# Altium footprint library TitansLib.PcbLib: 333 footprints (part 11 of 21)
Each footprint in its own frame and in the unit in brackets; x right, y up, seen from the top. Pads: shape width x height; smd on the part's side, far side on the other; paste and mask are expansions set on the pad; w line width, h text height; cw(c..) or ccw(c..) is an arc to the next point about the centre after c.
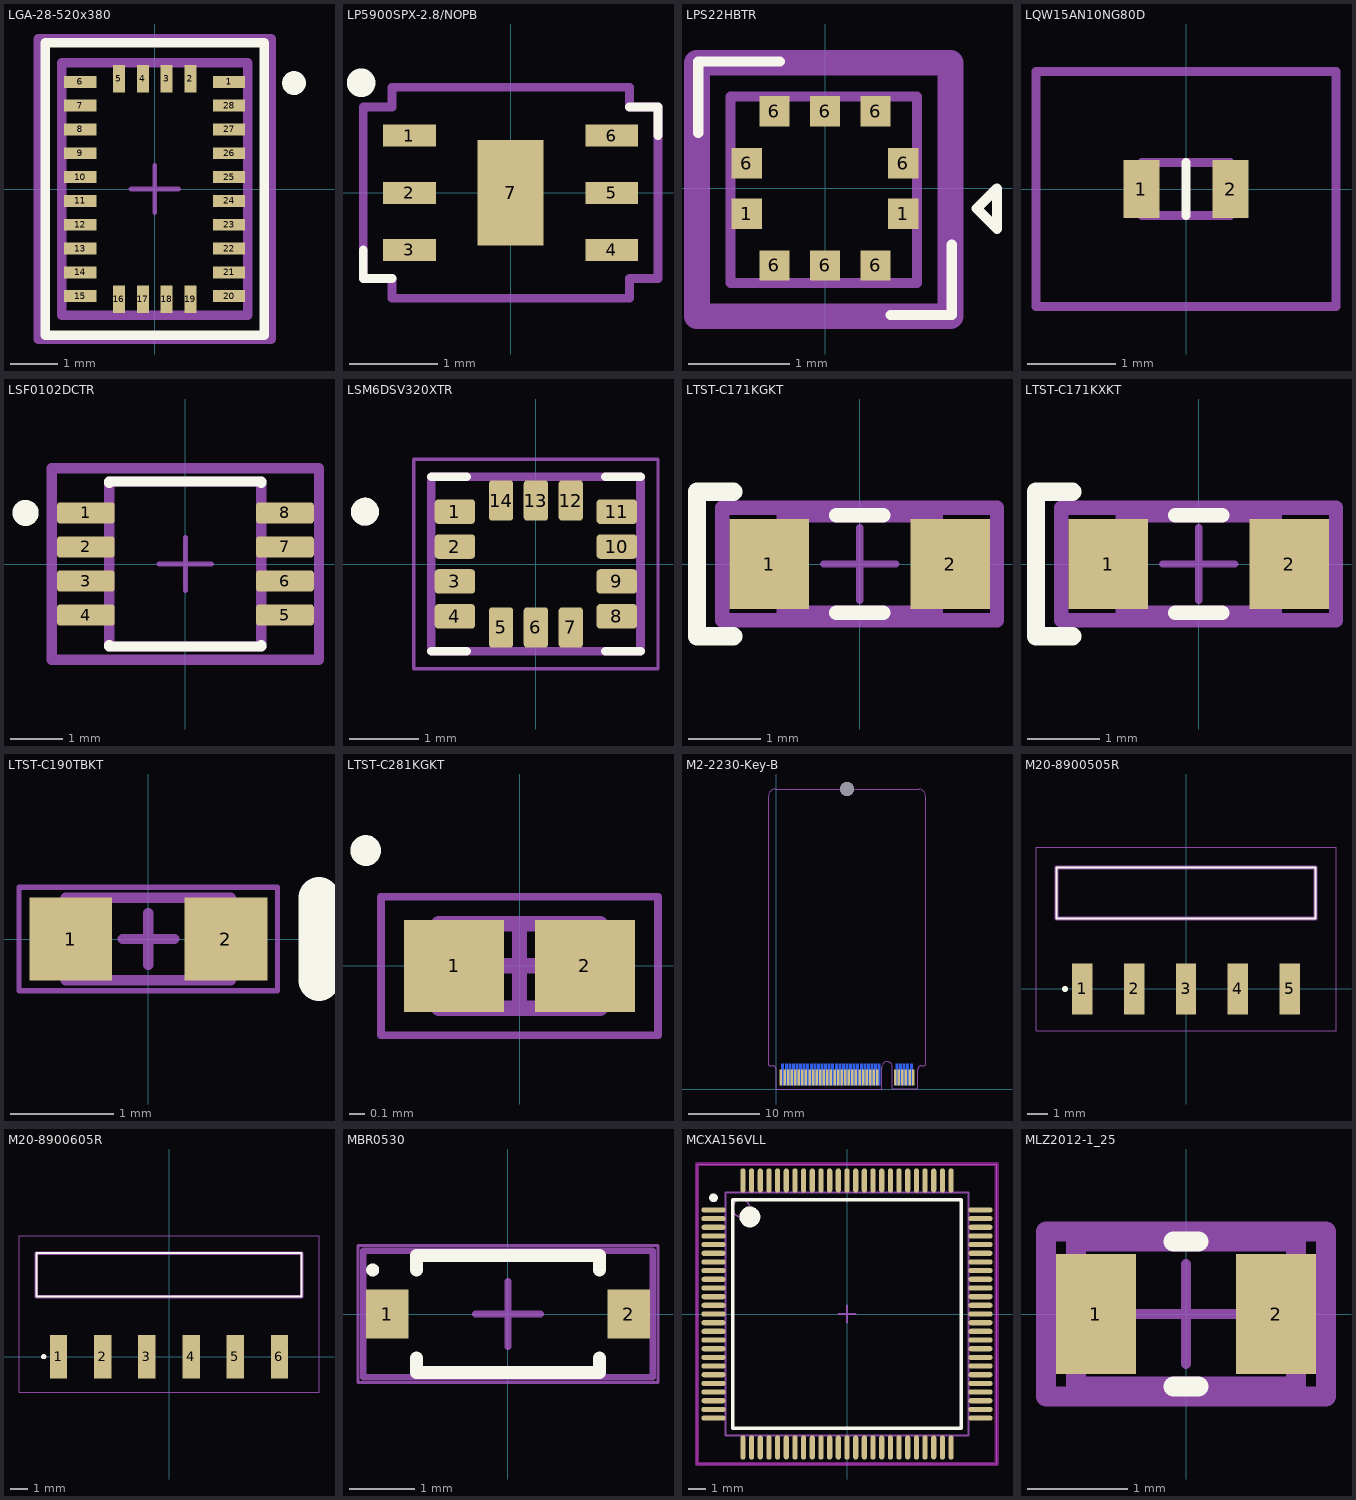
[diagram p10: the footprints below, top view; thin cyan lines are the x and y axes]

## LGA-28-520x380 [mm] "28 pin Land Grid Array Package. 5.2x3.8 mm"
pads (28):
  rect 0.675x0.25 smd paste+0 mask+0: 1(1.562,2.25) 6(-1.562,2.25) 7(-1.562,1.75) 8(-1.562,1.25) 9(-1.562,0.75) 10(-1.562,0.25) 11(-1.562,-0.25) 12(-1.562,-0.75) 13(-1.562,-1.25) 14(-1.562,-1.75) 15(-1.562,-2.25) 20(1.562,-2.25) 21(1.562,-1.75) 22(1.562,-1.25) 23(1.562,-0.75) 24(1.562,-0.25) 25(1.562,0.25) 26(1.562,0.75) 27(1.562,1.25) 28(1.562,1.75)
  rect 0.25x0.575 smd paste+0 mask+0: 2(0.75,2.312) 3(0.25,2.312) 4(-0.25,2.312) 5(-0.75,2.312) 16(-0.75,-2.312) 17(-0.25,-2.312) 18(0.25,-2.312) 19(0.75,-2.312)
Top Overlay:
  circle w0.25: c2.925,2.225 r0.125
  lines w0.2: -2.3,-3.075 2.3,-3.075 2.3,3.075 -2.3,3.075 -2.3,-3.075
Top 3D Body:
  lines w0.2: -1.95,-2.65 1.95,-2.65 1.95,2.65 -1.95,2.65 -1.95,-2.65
Top Courtyard:
  lines w0.2: -2.45,-3.15 2.45,-3.15 2.45,3.15 -2.45,3.15 -2.45,-3.15
Top Component Center:
  lines w0.1: -0.5,0 0.5,0 ; 0,-0.5 0,0.5
Top Assembly:
  lines w0.2: -2.45,-3.15 2.45,-3.15 2.45,3.15 -2.45,3.15 -2.45,-3.15
  text ".Designator" at 0,-0.001 h1
3D body "IC_Hillcrest_Laboratories_Inc_BNO085_eec.STEP": height 0.25, standoff 0, extent -2.45,-3.15 2.45,3.15

## LP5900SPX-2.8/NOPB [mm]
pads (7):
  rect 0.6x0.25 smd: 1(-1.15,0.65) 2(-1.15,0) 3(-1.15,-0.65) 4(1.15,-0.65) 5(1.15,0) 6(1.15,0.65)
  rect 0.75x1.2 smd: 7(0,0)
Top Overlay:
  circle w0.254: c-1.7,1.25 r0.035
  lines w0.1: -1.675,-0.65 -1.675,-0.975 -1.35,-0.975 ; 1.35,0.975 1.675,0.975 1.675,0.65
Top Courtyard:
  lines w0.1: -1.375,-0.975 -1.675,-0.975 -1.675,0.975 -1.35,0.975 -1.35,1.2 1.35,1.2 1.35,0.975 1.675,0.975 1.675,-0.975 1.375,-0.975 ; -1.35,-0.975 -1.35,-1.2 1.35,-1.2 1.35,-0.975
3D body "LP5900SDX-2.8_NOPB.step": height 0.81, standoff 0.01, extent -1.25,-1.1 1.25,1.1

## LPS22HBTR [mm]
pads (10):
  rect 0.3x0.3 smd mask+0.1: 1(-0.775,-0.25) 1(0.775,-0.25) 6(-0.775,0.25) 6(-0.5,-0.763) 6(-0.5,0.763) 6(0,-0.763) 6(0,0.763) 6(0.5,-0.763) 6(0.5,0.763) 6(0.775,0.25)
Top Overlay:
  lines w0.1: -1.254,0.546 -1.254,1.254 -0.446,1.254 ; 0.646,-1.254 1.254,-1.254 1.254,-0.554 ; 1.502,-0.2 1.702,-0.4 1.702,0 1.502,-0.2
Top Assembly:
  lines w0.1: -0.936,-0.936 0.91,-0.936 0.91,0.91 -0.936,0.91 -0.936,-0.936
  text ".Designator" at -0.821,-0.212 h1
Mechanical 15:
  lines w0.254: -1.267,-1.267 1.241,-1.267 1.241,1.241 -1.267,1.241 -1.267,-1.267
3D body "LPS22HBTR.stp": height 0.81, standoff 0.01, extent -1.003,-1 0.997,1

## LQW15AN10NG80D [mm]
pads (2):
  rect 0.41x0.66 smd: 1(-0.505,0) 2(0.505,0)
Top Overlay:
  lines w0.1: 0,-0.3 0,0.3
Bottom Assembly:
  lines w0.1: -1.7,-1.33 -1.7,1.33 1.7,1.33 1.7,-1.33 -1.7,-1.33
Mechanical 15:
  lines w0.1: -0.5,-0.3 -0.5,0.3 0.5,0.3 0.5,-0.3 -0.5,-0.3
3D body "LQW15AN2N2B80D.stp": height 0.6, standoff 0, extent -0.501,-0.249 0.499,0.251

## LSF0102DCTR [mm]
pads (8):
  rrect25% 1.1x0.4 smd paste+0 mask+0.051: 1(-1.9,0.975) 2(-1.9,0.325) 3(-1.9,-0.325) 4(-1.9,-0.975) 5(1.9,-0.975) 6(1.9,-0.325) 7(1.9,0.325) 8(1.9,0.975)
Top Overlay:
  circle w0.25: c-3.052,0.975 r0.125
  lines w0.2: -1.45,-1.55 -1.45,-1.575 1.45,-1.575 1.45,-1.55 ; -1.45,1.55 -1.45,1.575 1.45,1.575 1.45,1.55
Top 3D Body:
  lines w0.2: -1.45,-1.575 1.45,-1.575 1.45,1.575 -1.45,1.575 -1.45,-1.575
Top Courtyard:
  lines w0.2: -2.55,-1.825 2.55,-1.825 2.55,1.825 -2.55,1.825 -2.55,-1.825
Top Component Center:
  lines w0.1: -0.5,0 0.5,0 ; 0,-0.5 0,0.5
Top Assembly:
  lines w0.2: -2.55,-1.825 2.55,-1.825 2.55,1.825 -2.55,1.825 -2.55,-1.825
  text ".Designator" at 0,0.188 h1
3D body "IC_Texas_Instruments_SN74LVC3G34DCTR_eec.STEP": height 0.25, standoff 0, extent -2.55,-1.825 2.55,1.825

## LSM6DSV320XTR [mm]
height 0.86
pads (14):
  rrect29% 0.58x0.35 smd mask+0.025: 1(-1.16,0.75) 2(-1.16,0.25) 3(-1.16,-0.25) 4(-1.16,-0.75) 8(1.16,-0.75) 9(1.16,-0.25) 10(1.16,0.25) 11(1.16,0.75)
  rrect29% 0.35x0.58 smd mask+0.025: 5(-0.5,-0.91) 6(0,-0.91) 7(0.5,-0.91) 12(0.5,0.91) 13(0,0.91) 14(-0.5,0.91)
Top Overlay:
  circle w0.2: c-2.45,0.75 r0.1
  lines w0.127: -1.5,-1.25 -0.995,-1.25 ; -1.5,1.25 -0.995,1.25 ; 0.995,-1.25 1.5,-1.25 ; 0.995,1.25 1.5,1.25
Top Courtyard:
  lines w0.05: -1.75,-1.5 -1.75,1.5 1.75,1.5 1.75,-1.5 -1.75,-1.5
Mechanical 13:
  circle w0.2: c-2.45,0.75 r0.1
  lines w0.127: -1.5,-1.25 1.5,-1.25 1.5,1.25 -1.5,1.25 -1.5,-1.25
3D body "step_temp.STEP": height 0.83, standoff 0, extent -1.5,-1.25 1.5,1.25

## LTST-C171KGKT [mm]
pads (2):
  rect 1.1x1.25 smd paste+0 mask+0.05: 1(-1.25,0) 2(1.25,0)
Top Overlay:
  lines w0.2: -0.325,-0.675 0.325,-0.675 ; -0.325,0.675 0.325,0.675
  lines w0.254: -1.75,-1 -2.25,-1 -2.25,1 -1.75,1
Top 3D Body:
  lines w0.2: -1.05,-0.675 1.05,-0.675 1.05,0.675 -1.05,0.675 -1.05,-0.675
Top Courtyard:
  lines w0.2: -1.9,-0.775 1.9,-0.775 1.9,0.775 -1.9,0.775 -1.9,-0.775
Top Component Center:
  lines w0.1: -0.5,0 0.5,0 ; 0,-0.5 0,0.5
Top Assembly:
  lines w0.2: -1.9,-0.775 1.9,-0.775 1.9,0.775 -1.9,0.775 -1.9,-0.775
  text ".Designator" at 0,-0.001 h1
3D body "Diode_Lite-On_LTST-C171KGKT_eec.STEP": height 0.25, standoff 0, extent -1.9,-0.775 1.9,0.775

## LTST-C171KXKT [mm]
pads (2):
  rect 1.1x1.25 smd paste+0 mask+0.05: 1(-1.25,0) 2(1.25,0)
Top Overlay:
  lines w0.2: -0.325,-0.675 0.325,-0.675 ; -0.325,0.675 0.325,0.675
  lines w0.254: -1.75,-1 -2.25,-1 -2.25,1 -1.75,1
Top 3D Body:
  lines w0.2: -1.05,-0.675 -1.05,0.675 1.05,0.675 1.05,-0.675 -1.05,-0.675
Top Courtyard:
  lines w0.2: -1.9,-0.775 -1.9,0.775 1.9,0.775 1.9,-0.775 -1.9,-0.775
Top Component Center:
  lines w0.1: -0.5,0 0.5,0 ; 0,-0.5 0,0.5
Top Assembly:
  lines w0.2: -1.9,-0.775 -1.9,0.775 1.9,0.775 1.9,-0.775 -1.9,-0.775
  text ".Designator" at 0,-0.001 h1
3D body "LTST-C171KRKT.step": height 0.8, standoff 0, extent -1,-0.625 1,0.625

## LTST-C190TBKT [mm] "SMD, 2-Leads, Body 1.6x0.8mm"
height 0.9
pads (2):
  rect 0.8x0.8 smd mask+0.05: 1(-0.75,0) 2(0.75,0)
Top Overlay:
  lines w0.4: 1.65,-0.4 1.65,0.4
Mechanical 13:
  lines w0.1: -0.8,-0.4 -0.8,0.4 0.8,0.4 0.8,-0.4 -0.8,-0.4
Mechanical 15:
  lines w0.05: -1.25,-0.5 1.25,-0.5 1.25,0.5 -1.25,0.5 -1.25,-0.5
  lines w0.1: -0.25,0 0.25,0 ; 0,-0.25 0,0.25
3D body: height 0.8, standoff 0.28, extent -0.55,-0.4 0.55,0.4
3D body: height 0.28, standoff 0, extent -0.8,-0.4 0.8,0.4

## LTST-C281KGKT [mm] "Chip Diode, 2-Leads, Body 1,00x0,50mm, IPC Medium Density"
height 0.35
pads (2):
  rect 0.65x0.6 smd: 1(-0.425,0) 2(0.425,0)
Top Overlay:
  circle w0.1: c-1,0.75 r0.05
Top Courtyard:
  lines w0.05: -0.9,-0.45 0.9,-0.45 0.9,0.45 -0.9,0.45 -0.9,-0.45
  lines w0.1: -0.275,0 0.275,0 ; 0,-0.275 0,0.275
Top Assembly:
  lines w0.1: -0.525,-0.275 0.525,-0.275 0.525,0.275 -0.525,0.275 -0.525,-0.275
3D body "LTST-C281KGKT.stp": height 0.35, standoff 0, extent -0.5,-0.25 0.5,0.25

## M2-2230-Key-B [mm] "M.2 2230 type B Flipper_one pinnout"
height 3
pads (67):
  rect 0.35x2.2 smd: 1(19.175,1.6) 3(18.675,1.6) 5(18.175,1.6) 7(17.675,1.6) 9(17.175,1.6) 11(16.675,1.6) 21(14.175,1.6) 23(13.675,1.6) 25(13.175,1.6) 27(12.675,1.6) 29(12.175,1.6) 31(11.675,1.6) 33(11.175,1.6) 35(10.675,1.6) 37(10.175,1.6) 39(9.675,1.6) 41(9.175,1.6) 43(8.675,1.6) 45(8.175,1.6) 47(7.675,1.6) 49(7.175,1.6) 51(6.675,1.6) 53(6.175,1.6) 55(5.675,1.6) 57(5.175,1.6) 59(4.675,1.6) 61(4.175,1.6) 63(3.675,1.6) 65(3.175,1.6) 67(2.675,1.6) 69(2.175,1.6) 71(1.675,1.6) 73(1.175,1.6) 75(0.675,1.6)
  rect 0.35x3 smd far side: 2(18.925,2) 4(18.425,2) 6(17.925,2) 8(17.425,2) 10(16.925,2) 20(14.425,2) 22(13.925,2) 24(13.425,2) 26(12.925,2) 28(12.425,2) 30(11.925,2) 32(11.425,2) 34(10.925,2) 36(10.425,2) 38(9.925,2) 40(9.425,2) 42(8.925,2) 44(8.425,2) 46(7.925,2) 48(7.425,2) 50(6.925,2) 52(6.425,2) 54(5.925,2) 56(5.425,2) 58(4.925,2) 60(4.425,2) 62(3.925,2) 64(3.425,2) 66(2.925,2) 68(2.425,2) 70(1.925,2) 72(1.425,2) 74(0.925,2)
via 9.925,42 diameter 2 hole 2
Top Solder:
  region: 11.924,41.95 10.924,41.95 10.914,41.855 10.869,41.671 10.79,41.499 10.68,41.344 10.542,41.213 10.383,41.111 10.206,41.04 10.02,41.005 9.925,41 9.83,41.005 9.644,41.04 9.467,41.111 9.308,41.213 9.17,41.344 9.06,41.499 8.981,41.671 8.935,41.855 8.926,41.95 7.926,41.95 7.93,41.756 8.014,41.378 8.169,41.023 8.39,40.704 8.667,40.433 8.992,40.221 9.351,40.075 9.731,40 9.925,40 10.119,40 10.499,40.074 10.858,40.221 11.183,40.433 11.46,40.704 11.681,41.022 11.836,41.378 11.919,41.756
  region: 16.292,0.025 16.292,2.75 19.825,2.75 19.825,0.025
  region: 0.025,0.025 0.025,2.75 14.792,2.75 14.792,0.025
Bottom Solder:
  region: 16.292,0.025 16.292,2.75 19.825,2.75 19.825,0.025
  region: 0.025,0.025 0.025,2.75 14.792,2.75 14.792,0.025
Mechanical 15:
  lines w0.1: -1.075,3.45 ccw(c-0.875,3.45) -0.875,3.25 -0.5,3.25 cw(c-0.5,2.75) 0,2.75 0,0 14.792,0 14.792,3.069 cw(c15.542,3.063) 16.292,3.063 16.292,0.025 19.85,0.025 19.85,2.75 cw(c20.35,2.75) 20.35,3.25 20.725,3.25 ccw(c20.725,3.45) 20.925,3.45 20.925,41 ccw(c19.925,41) 19.925,42 9.925,42 -0.075,42 ccw(c-0.075,41) -1.075,41 -1.075,3.45

## M20-8900505R [mm]
pads (5):
  rect 1x2.5 smd: 1(-5.08,0) 2(-2.54,0) 3(0,0) 4(2.54,0) 5(5.08,0)
Top Overlay:
  circle w0.2: c-5.93,0 r0.05
  lines w0.1: -6.35,3.45 6.35,3.45 6.35,5.95 -6.35,5.95 -6.35,3.45
Mechanical 13:
  lines w0.2: -6.35,3.45 6.35,3.45 6.35,5.95 -6.35,5.95 -6.35,3.45
Mechanical 15:
  lines w0.05: -7.35,-2.05 7.35,-2.05 7.35,6.95 -7.35,6.95 -7.35,-2.05
3D body "M20-8900505R.stp": height 3.46, standoff 0, extent -6.35,-1.24 6.35,12

## M20-8900605R [mm]
pads (6):
  rect 1x2.5 smd: 1(-6.35,0) 2(-3.81,0) 3(-1.27,0) 4(1.27,0) 5(3.81,0) 6(6.35,0)
Top Overlay:
  circle w0.2: c-7.2,0 r0.05
  lines w0.1: -7.62,3.45 7.62,3.45 7.62,5.95 -7.62,5.95 -7.62,3.45
Mechanical 13:
  lines w0.2: -7.62,3.45 7.62,3.45 7.62,5.95 -7.62,5.95 -7.62,3.45
Mechanical 15:
  lines w0.05: -8.62,-2.05 8.62,-2.05 8.62,6.95 -8.62,6.95 -8.62,-2.05
3D body "M20-8900605R.stp": height 3.46, standoff 0, extent -7.62,-6.15 7.62,7.09

## MBR0530 [mm] "SODFL, 2-Leads, Body 1.60x3.71mm, IPC Medium Density"
height 1.35
pads (2):
  rect 0.65x0.75 smd: 1(-1.85,0) 2(1.85,0)
Top Overlay:
  circle w0.1: c-2.075,0.675 r0.05
  lines w0.2: -1.4,-0.675 -1.4,-0.9 1.4,-0.9 1.4,-0.675 ; -1.4,0.675 -1.4,0.9 1.4,0.9 1.4,0.675
Top Courtyard:
  lines w0.05: -2.3,-1.05 2.3,-1.05 2.3,1.05 -2.3,1.05 -2.3,-1.05
  lines w0.1: -0.5,0 0.5,0 ; 0,-0.5 0,0.5
Top Assembly:
  lines w0.1: -2.223,-0.973 2.223,-0.973 2.223,0.973 -2.223,0.973 -2.223,-0.973
  text ".Designator" at -2.165,-0.187 h1
3D body "SOD-123_ONS.step": height 1.35, standoff 0, extent -1.93,-0.902 1.93,0.902

## MCXA156VLL [mm] "SQFP, 100-Leads, Body 14,00x14,00mm, Pitch 0,50mm, IPC Medium Density"
height 1.7
pads (100):
  oval 1.4x0.3 smd: 1(-7.7,6) 2(-7.7,5.5) 3(-7.7,5) 4(-7.7,4.5) 5(-7.7,4) 6(-7.7,3.5) 7(-7.7,3) 8(-7.7,2.5) 9(-7.7,2) 10(-7.7,1.5) 11(-7.7,1) 12(-7.7,0.5) 13(-7.7,0) 14(-7.7,-0.5) 15(-7.7,-1) 16(-7.7,-1.5) 17(-7.7,-2) 18(-7.7,-2.5) 19(-7.7,-3) 20(-7.7,-3.5) 21(-7.7,-4) 22(-7.7,-4.5) 23(-7.7,-5) 24(-7.7,-5.5) 25(-7.7,-6) 51(7.7,-6) 52(7.7,-5.5) 53(7.7,-5) 54(7.7,-4.5) 55(7.7,-4) 56(7.7,-3.5) 57(7.7,-3) 58(7.7,-2.5) 59(7.7,-2) 60(7.7,-1.5) 61(7.7,-1) 62(7.7,-0.5) 63(7.7,0) 64(7.7,0.5) 65(7.7,1) 66(7.7,1.5) 67(7.7,2) 68(7.7,2.5) 69(7.7,3) 70(7.7,3.5) 71(7.7,4) 72(7.7,4.5) 73(7.7,5) 74(7.7,5.5) 75(7.7,6)
  oval 0.3x1.4 smd: 26(-6,-7.7) 27(-5.5,-7.7) 28(-5,-7.7) 29(-4.5,-7.7) 30(-4,-7.7) 31(-3.5,-7.7) 32(-3,-7.7) 33(-2.5,-7.7) 34(-2,-7.7) 35(-1.5,-7.7) 36(-1,-7.7) 37(-0.5,-7.7) 38(0,-7.7) 39(0.5,-7.7) 40(1,-7.7) 41(1.5,-7.7) 42(2,-7.7) 43(2.5,-7.7) 44(3,-7.7) 45(3.5,-7.7) 46(4,-7.7) 47(4.5,-7.7) 48(5,-7.7) 49(5.5,-7.7) 50(6,-7.7) 76(6,7.7) 77(5.5,7.7) 78(5,7.7) 79(4.5,7.7) 80(4,7.7) 81(3.5,7.7) 82(3,7.7) 83(2.5,7.7) 84(2,7.7) 85(1.5,7.7) 86(1,7.7) 87(0.5,7.7) 88(0,7.7) 89(-0.5,7.7) 90(-1,7.7) 91(-1.5,7.7) 92(-2,7.7) 93(-2.5,7.7) 94(-3,7.7) 95(-3.5,7.7) 96(-4,7.7) 97(-4.5,7.7) 98(-5,7.7) 99(-5.5,7.7) 100(-6,7.7)
Top Overlay:
  circle w0.25: c-7.7,6.7 r0.125
  circle w0.6: c-5.6,5.6 r0.3
  lines w0.2: -6.6,-6.6 -6.6,6.6 6.6,6.6 6.6,-6.6 -6.6,-6.6
Keep-Out Layer:
  lines w0.254: 8.636,8.65 8.636,-8.636 8.622,-8.65 -8.65,-8.65 -8.65,8.65 8.65,8.65
Top Courtyard:
  lines w0.05: -8.65,-8.65 -8.65,8.65 8.65,8.65 8.65,-8.65 -8.65,-8.65
  lines w0.1: -0.5,0 0.5,0 ; 0,-0.5 0,0.5
Top Assembly:
  circle w0.1: c-6.1,6.1 r0.5
  lines w0.1: -7,-7 -7,7 7,7 7,-7 -7,-7
3D body "MCXA156VLL.stp": height 1.51, standoff 0.01, extent -7.984,-8.029 8.016,7.971

## MLZ2012-1_25 [mm]
pads (2):
  rect 0.8x1.2 smd paste+0 mask+0.05: 1(-0.9,0) 2(0.9,0)
Top Overlay:
  lines w0.2: -0.125,-0.725 0.125,-0.725 ; -0.125,0.725 0.125,0.725
Top 3D Body:
  lines w0.2: -1.1,-0.725 1.1,-0.725 1.1,0.725 -1.1,0.725 -1.1,-0.725
Top Courtyard:
  lines w0.2: -1.4,-0.825 1.4,-0.825 1.4,0.825 -1.4,0.825 -1.4,-0.825
Top Component Center:
  lines w0.1: -0.5,0 0.5,0 ; 0,-0.5 0,0.5
Top Assembly:
  lines w0.2: -1.4,-0.825 1.4,-0.825 1.4,0.825 -1.4,0.825 -1.4,-0.825
3D body "Ind_TDK_MLZ2012N100LTD25_eec.STEP": height 0.25, standoff 0, extent -1.4,-0.825 1.4,0.825